# Altium schematic symbol library Datalogger_RevA_Clean.SchLib: 59 symbols
Pins are listed as number, name and electrical type; pins without a type are passive.

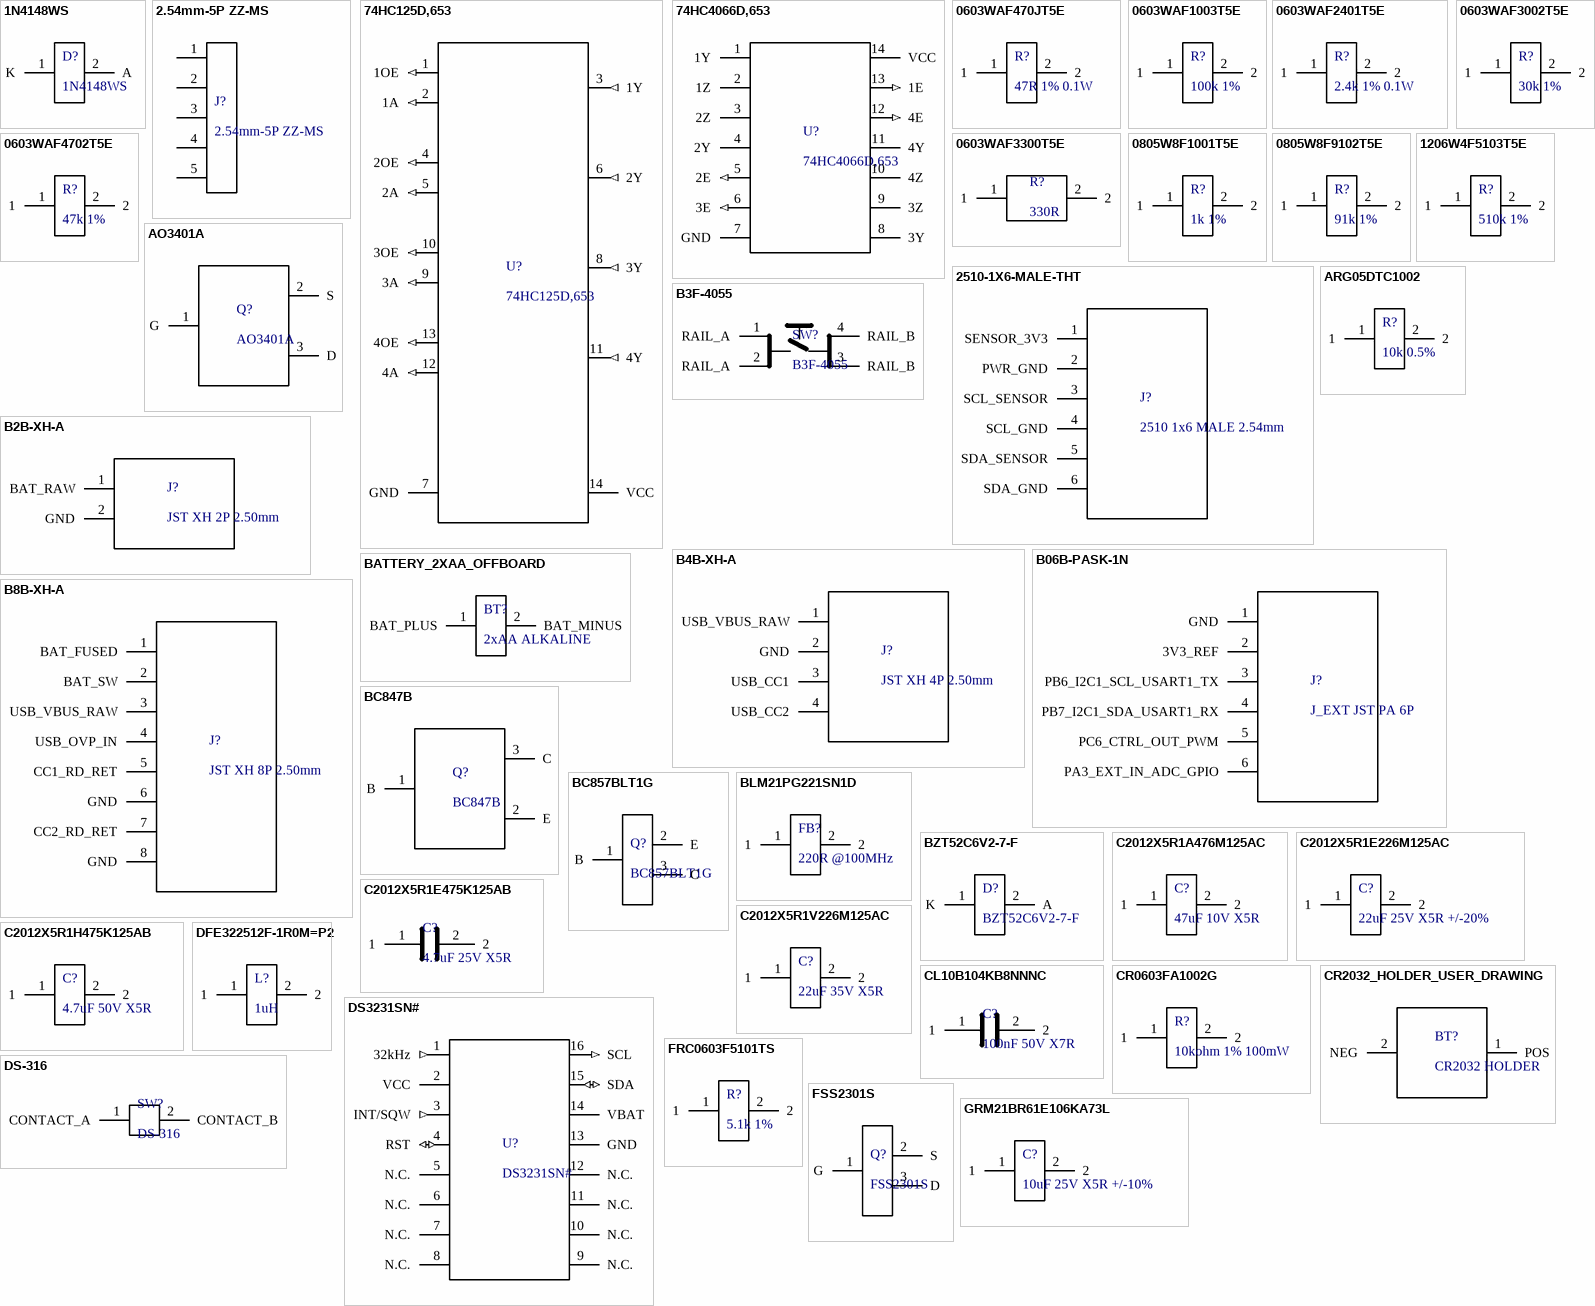
[diagram p0: symbols 1N4148WS to GRM21BR61E106KA73L]

## 1N4148WS
designator D?
Fast switching diode; SOD323; pin 1 cathode K, pin 2 anode A for Task19 delay discharge path; Manufacturer: MULTISOURCE; FOOTPRINT GEOMETRY SOURCE=Diodes Incorporated; Source_Baseline: Datalogger_OLED_SHT3x_Final_BOM_RevA_v1.3_FA.pdf + TASK18_RTC_RELEASE_2026-08-22 + TASK19_CONTROLLED_DELTAS_2026-08-22; Design_Status: TASK19_BOM_DEVICE_GEOMETRY_DIODES_INC_REFERENCE; Qualification_Status: UNQUALIFIED_PENDING_SAVE_REOPEN_AUDIT; PIN_NUMBER_SOURCE: MANUFACTURER_DATASHEET; MPN: 1N4148WS; Value: 1N4148WS; Package: SOD323; Datasheet: https://www.diodes.com/datasheet/download/1N4148WS.pdf; PIN_FUNCTION_SOURCE: MANUFACTURER_DATASHEET
footprint DIODES_SOD323_1N4148WS_2P (Task19 controlled footprint model link)
pins: 1 K, 2 A

## 2.54mm-5P ZZ-MS
designator J?
Five-position vertical THT Navigation connector; SHOUHAN drawing pitch 2.50 mm; Manufacturer: SHENZHEN SHOUHAN TECHNOLOGY CO., LTD; Source_Baseline: TASK17_NAVIGATION_ENTRY_BASELINE_v1.0_FA.txt; Design_Status: DESIGN_LOCK_NAV_V1.0_JNAV; Qualification_Status: UNQUALIFIED_PENDING_SAVE_REOPEN_AUDIT; PIN_NUMBER_SOURCE: PROJECT_INTERNAL_CONVENTION_LEFT_TO_RIGHT; PIN_FUNCTION_SOURCE: NAVIGATION_V1.0_PROJECT_CONNECTOR_MAPPING; MPN: 2.54mm-5P ZZ-MS; Value: 2.54mm-5P ZZ-MS; Package: 1x5 vertical THT; drawing pitch 2.50mm; Datasheet: SHOUHAN exact 2.54mm-5P ZZ-MS specification/drawing
footprint SHOUHAN_2P50_1X05_ZZMS_THT (Datalogger Rev-A Task17 Navigation J_NAV physical model link)
pins: 1, 2, 3, 4, 5

## 74HC125D,653
designator U?
Quad buffer/line driver with 3-state outputs; OE active-low; Manufacturer: Nexperia; Source_Baseline: MICROSD_SCHEMATIC_ENTRY_BASELINE_v1.2_FA.txt; Design_Status: DESIGN_LOCK_MICROSD_V1.2; Qualification_Status: UNQUALIFIED_PENDING_SAVE_REOPEN_AUDIT; PIN_NUMBER_SOURCE: MANUFACTURER_DATASHEET; MPN: 74HC125D,653; Value: 74HC125D,653; Package: SO14 / SOT108-1; Datasheet: https://assets.nexperia.com/documents/data-sheet/74HC_HCT125.pdf; PIN_FUNCTION_SOURCE: MANUFACTURER_DATASHEET
footprint NEXPERIA_SOT108_1_SO14_14P (Datalogger Rev-A T16 MicroSD physical model link)
pins: 1 1OE (in), 2 1A (in), 3 1Y (out), 4 2OE (in), 5 2A (in), 6 2Y (out), 7 GND (power), 8 3Y (out), 9 3A (in), 10 3OE (in), 11 4Y (out), 12 4A (in), 13 4OE (in), 14 VCC (power)

## 74HC4066D,653
designator U?
Nexperia quad SPST analog switch; enable inputs active HIGH; SO14 SOT108-1; Source_Baseline: Datalogger_OLED_SHT3x_Final_BOM_RevA_v1.3_FA.pdf + TASK18_RTC_RELEASE_2026-08-22 + TASK19_CONTROLLED_DELTAS_2026-08-22; Design_Status: TASK19_CONTROLLED_NEXPERIA_REV12; Qualification_Status: UNQUALIFIED_PENDING_SAVE_REOPEN_AUDIT; PIN_NUMBER_SOURCE: MANUFACTURER_DATASHEET; Manufacturer: Nexperia; MPN: 74HC4066D,653; Value: 74HC4066D,653; Package: SO14 / SOT108-1; Datasheet: https://assets.nexperia.com/documents/data-sheet/74HC_HCT4066.pdf; PIN_FUNCTION_SOURCE: MANUFACTURER_DATASHEET
footprint NEXPERIA_SOT108_1_SO14_14P (Task19 controlled footprint model link)
pins: 1 1Y, 2 1Z, 3 2Z, 4 2Y, 5 2E (in), 6 3E (in), 7 GND (power), 8 3Y, 9 3Z, 10 4Z, 11 4Y, 12 4E (in), 13 1E (in), 14 VCC (power)

## 0603WAF470JT5E
designator R?, comment 47R 1% 0.1W
Task19 SHT3x I2C series resistor; Manufacturer: UNI-ROYAL; MPN: 0603WAF470JT5E; Source_Baseline: Datalogger_OLED_SHT3x_Final_BOM_RevA_v1.3_FA.pdf + TASK18_RTC_RELEASE_2026-08-22 + TASK19_CONTROLLED_DELTAS_2026-08-22; Design_Status: TASK19_CONTROLLED_BOM_REUSE_RES_0603_SHARED_2P; Qualification_Status: UNQUALIFIED_PENDING_SAVE_REOPEN_AUDIT; PIN_NUMBER_SOURCE: INTERNAL_CONVENTION; PIN_FUNCTION_SOURCE: SYMMETRIC_PASSIVE_DEVICE; Value: 47R 1% 0.1W; Package: 0603 / 1608 metric; Datasheet: Controlled BOM value/package; existing UNI-ROYAL WAF family in released project library
footprint RES_0603_SHARED_2P (Task19 controlled footprint model link)
pins: 1, 2

## 0603WAF1003T5E
designator R?, comment 100k 1%
OVP resistor; Manufacturer: UNI-ROYAL; MPN: 0603WAF1003T5E; Source_Baseline: POWER_SCHEMATIC_ENTRY_BASELINE_v0.17_FA.txt; Design_Status: CONTROLLED_V0.17_P9; Qualification_Status: UNQUALIFIED_PENDING_SAVE_REOPEN_AUDIT; PIN_NUMBER_SOURCE: INTERNAL_CONVENTION; PIN_FUNCTION_SOURCE: MANUFACTURER_DATASHEET; Value: 100k 1%; Package: 0603; Datasheet: UNI-ROYAL manufacturer resistor data
footprint RES_0603_SHARED_2P (Datalogger Rev-A G010)
pins: 1, 2

## 0603WAF2401T5E
designator R?, comment 2.4k 1% 0.1W
Task19 external SHT3x I2C pull-up resistor; Manufacturer: UNI-ROYAL; MPN: 0603WAF2401T5E; Source_Baseline: Datalogger_OLED_SHT3x_Final_BOM_RevA_v1.3_FA.pdf + TASK18_RTC_RELEASE_2026-08-22 + TASK19_CONTROLLED_DELTAS_2026-08-22; Design_Status: TASK19_CONTROLLED_BOM_REUSE_RES_0603_SHARED_2P; Qualification_Status: UNQUALIFIED_PENDING_SAVE_REOPEN_AUDIT; PIN_NUMBER_SOURCE: INTERNAL_CONVENTION; PIN_FUNCTION_SOURCE: SYMMETRIC_PASSIVE_DEVICE; Value: 2.4k 1% 0.1W; Package: 0603 / 1608 metric; Datasheet: Controlled BOM value/package; existing UNI-ROYAL WAF family in released project library
footprint RES_0603_SHARED_2P (Task19 controlled footprint model link)
pins: 1, 2

## 0603WAF3002T5E
designator R?, comment 30k 1%
Power network resistor; Manufacturer: UNI-ROYAL; MPN: 0603WAF3002T5E; Source_Baseline: POWER_SCHEMATIC_ENTRY_BASELINE_v0.17_FA.txt; Design_Status: DESIGN_LOCK_V0.17; Qualification_Status: UNQUALIFIED_PENDING_SAVE_REOPEN_AUDIT; PIN_NUMBER_SOURCE: INTERNAL_CONVENTION; PIN_FUNCTION_SOURCE: MANUFACTURER_DATASHEET; Value: 30k 1%; Package: 0603; Datasheet: UNI-ROYAL manufacturer resistor data
footprint RES_0603_SHARED_2P (Datalogger Rev-A G010)
pins: 1, 2

## 0603WAF3300T5E
designator R?, comment 330R
External-port series resistor; 330 ohm 1% 100mW 0603; Manufacturer: UNI-ROYAL; MPN: 0603WAF3300T5E; Value: 330R 1%; Source_Baseline: T21_JEXT_PROTECTION_LOCK_2026-08-28; Design_Status: T21_LOCK; Qualification_Status: CONTROLLED; PIN_NUMBER_SOURCE: INTERNAL_CONVENTION; PIN_FUNCTION_SOURCE: PASSIVE_RESISTOR; Package: 0603; Power: 100mW; Datasheet: UNI-ROYAL 0603WAF3300T5E / LCSC C23138
footprint RES_0603_SHARED_2P (T21 330R series resistor shared 0603 footprint)
pins: 1, 2

## 0603WAF4702T5E
designator R?, comment 47k 1%
OVP resistor; Manufacturer: UNI-ROYAL; MPN: 0603WAF4702T5E; Source_Baseline: POWER_SCHEMATIC_ENTRY_BASELINE_v0.17_FA.txt; Design_Status: CONTROLLED_V0.17_P9; Qualification_Status: UNQUALIFIED_PENDING_SAVE_REOPEN_AUDIT; PIN_NUMBER_SOURCE: INTERNAL_CONVENTION; PIN_FUNCTION_SOURCE: MANUFACTURER_DATASHEET; Value: 47k 1%; Package: 0603; Datasheet: UNI-ROYAL manufacturer resistor data
footprint RES_0603_SHARED_2P (Datalogger Rev-A G010)
pins: 1, 2

## 0805W8F1001T5E
designator R?, comment 1k 1%
OVP series resistor; Manufacturer: UNI-ROYAL; MPN: 0805W8F1001T5E; Source_Baseline: POWER_SCHEMATIC_ENTRY_BASELINE_v0.17_FA.txt; Design_Status: CONTROLLED_V0.17_P9; Qualification_Status: UNQUALIFIED_PENDING_SAVE_REOPEN_AUDIT; PIN_NUMBER_SOURCE: INTERNAL_CONVENTION; PIN_FUNCTION_SOURCE: MANUFACTURER_DATASHEET; Value: 1k 1%; Package: 0805; Datasheet: UNI-ROYAL manufacturer resistor data
footprint RES_0805_SHARED_2P (Datalogger Rev-A G011)
pins: 1, 2

## 0805W8F9102T5E
designator R?, comment 91k 1%
Power feedback/hysteresis resistor; Manufacturer: UNI-ROYAL; MPN: 0805W8F9102T5E; Source_Baseline: POWER_SCHEMATIC_ENTRY_BASELINE_v0.17_FA.txt; Design_Status: DESIGN_LOCK_V0.17; Qualification_Status: UNQUALIFIED_PENDING_SAVE_REOPEN_AUDIT; PIN_NUMBER_SOURCE: INTERNAL_CONVENTION; PIN_FUNCTION_SOURCE: MANUFACTURER_DATASHEET; Value: 91k 1%; Package: 0805; Datasheet: UNI-ROYAL manufacturer resistor data
footprint RES_0805_SHARED_2P (Datalogger Rev-A G011)
pins: 1, 2

## 1206W4F5103T5E
designator R?, comment 510k 1%
Power feedback resistor; Manufacturer: UNI-ROYAL; MPN: 1206W4F5103T5E; Source_Baseline: POWER_SCHEMATIC_ENTRY_BASELINE_v0.17_FA.txt; Design_Status: DESIGN_LOCK_V0.17; Qualification_Status: UNQUALIFIED_PENDING_SAVE_REOPEN_AUDIT; PIN_NUMBER_SOURCE: INTERNAL_CONVENTION; PIN_FUNCTION_SOURCE: MANUFACTURER_DATASHEET; Value: 510k 1%; Package: 1206; Datasheet: UNI-ROYAL manufacturer resistor data
footprint UNIROYAL_RES_1206_2P (Datalogger Rev-A G012)
pins: 1, 2

## 2510-1X6-MALE-THT
designator J?, comment 2510 1x6 MALE 2.54mm
PCB-mounted internal SHT3x harness connector; 6-pin straight male 2.54 mm 2510-style THT; external metal/military panel connector remains separate; Manufacturer: GENERIC; MPN: 2510-1X6-MALE-THT; Source_Baseline: T20_USER_APPROVAL_2026-08-26; Design_Status: TASK20_CONTROLLED_PCB_CONNECTOR; Qualification_Status: MECHANICAL_FIT_PENDING_PHYSICAL_SAMPLE; PIN_NUMBER_SOURCE: PROJECT_INTERNAL_PCB_ORDER_LOCK_2026-08-26; PIN_FUNCTION_SOURCE: USER_APPROVED_T20_SIGNAL_ORDER_2026-08-26; Value: 2510 1x6 MALE 2.54mm; Package: THT 1x6, pitch 2.54 mm; Datasheet: USER_SUPPLIED_6CCT_2P54_DRAWING_2026-08-26; supplier code 2171001040
footprint GENERIC_2510_1X6_P2P54_THT (Task20 controlled 2510 1x6 PCB harness connector footprint | same-folder PcbLib verified v0.1.1)
pins: 1 SENSOR_3V3, 2 PWR_GND, 3 SCL_SENSOR, 4 SCL_GND, 5 SDA_SENSOR, 6 SDA_GND

## AO3401A
designator Q?
-30V P-channel MOSFET used as switched SD_VDD high-side pass element; Manufacturer: Alpha & Omega Semiconductor; Source_Baseline: MICROSD_SCHEMATIC_ENTRY_BASELINE_v1.2_FA.txt; Design_Status: DESIGN_LOCK_MICROSD_V1.2_PIN_NUMBER_CONVENTION_PENDING_FOOTPRINT_CROSSCHECK; Qualification_Status: UNQUALIFIED_PENDING_SAVE_REOPEN_AUDIT; PIN_NUMBER_SOURCE: INTERNAL_CONVENTION_PENDING_PHYSICAL_ORIENTATION_CROSSCHECK; PIN_FUNCTION_SOURCE: MANUFACTURER_DATASHEET; MPN: AO3401A; Value: AO3401A; Package: SOT-23; Datasheet: https://www.aosmd.com/sites/default/files/res/datasheets/AO3401A.pdf
footprint AOS_SOT23_AO3401A_3P (Datalogger Rev-A T16 MicroSD physical model link)
pins: 1 G, 2 S, 3 D

## ARG05DTC1002
designator R?, comment 10k 0.5%
Precision power network resistor; Manufacturer: Viking Tech; MPN: ARG05DTC1002; Source_Baseline: POWER_SCHEMATIC_ENTRY_BASELINE_v0.17_FA.txt; Design_Status: DESIGN_LOCK_V0.17; Qualification_Status: UNQUALIFIED_PENDING_SAVE_REOPEN_AUDIT; PIN_NUMBER_SOURCE: INTERNAL_CONVENTION; PIN_FUNCTION_SOURCE: MANUFACTURER_DATASHEET; Value: 10k 0.5%; Package: 0805 / ARG05; Datasheet: Viking Tech AR series product data
footprint RES_0805_SHARED_2P (Datalogger Rev-A G011)
pins: 1, 2

## B2B-XH-A
designator J?, comment JST XH 2P 2.50mm
PCB-mounted keyed battery harness header; mates with XHP-2 housing; T22 J_BAT interface; Manufacturer: JST (J.S.T. Mfg. Co., Ltd.); MPN: B2B-XH-A(LF)(SN); Contact: SXH-001T-P0.6; Current_Rating: 3A AC/DC with AWG22; Voltage_Rating: 250V AC/DC; Wire_Range: AWG28 to AWG22 with SXH-001T-P0.6; Source_Baseline: T22_USER_APPROVAL_2026-08-29; Design_Status: TASK22_CONTROLLED_POWER_CONNECTOR; Qualification_Status: LIBRARY_GATE_PENDING; PHYSICAL_SAMPLE_FIT_PENDING; PIN_NUMBER_SOURCE: JST_XH_OFFICIAL_MOUNTING_SURFACE_VIEW; PIN_FUNCTION_SOURCE: T22_LOCKED_POWER_CONNECTOR_PINOUT_2026-08-29; Housing: XHP-2; Pitch: 2.50 mm; Datasheet: https://www.jst-mfg.com/product/pdf/eng/eXH.pdf
pins: 1 BAT_RAW, 2 GND

## B3F-4055
designator SW?
Momentary tactile reset switch; four physical terminals preserved; Manufacturer: OMRON; Source_Baseline: MCU_SCHEMATIC_ENTRY_BASELINE_v2.1_FA.txt; Design_Status: DESIGN_LOCK_MCU_CORE_V2.1_FOOTPRINT_HOLD; Qualification_Status: UNQUALIFIED_PENDING_SAVE_REOPEN_AUDIT; PIN_NUMBER_SOURCE: INTERNAL_CONVENTION; PIN_FUNCTION_SOURCE: MANUFACTURER_DATASHEET; MPN: B3F-4055; Value: B3F-4055; Package: 12x12 mm THT tactile switch; Datasheet: https://omronfs.omron.com/en_US/ecb/products/pdf/en-b3f.pdf
footprint OMRON_B3F_12X12_THT_4P (Datalogger Rev-A Task13 MCU Core physical model link)
pins: 1 RAIL_A, 2 RAIL_A, 3 RAIL_B, 4 RAIL_B

## B4B-XH-A
designator J?, comment JST XH 4P 2.50mm
PCB-mounted keyed USB-C panel harness header; mates with XHP-4 housing; T22 J_USB_PANEL interface; Manufacturer: JST (J.S.T. Mfg. Co., Ltd.); MPN: B4B-XH-A(LF)(SN); Contact: SXH-001T-P0.6; Current_Rating: 3A AC/DC with AWG22; Voltage_Rating: 250V AC/DC; Wire_Range: AWG28 to AWG22 with SXH-001T-P0.6; Source_Baseline: T22_USER_APPROVAL_2026-08-29; Design_Status: TASK22_CONTROLLED_POWER_CONNECTOR; Qualification_Status: LIBRARY_GATE_PENDING; PHYSICAL_SAMPLE_FIT_PENDING; PIN_NUMBER_SOURCE: JST_XH_OFFICIAL_MOUNTING_SURFACE_VIEW; PIN_FUNCTION_SOURCE: T22_LOCKED_POWER_CONNECTOR_PINOUT_2026-08-29; Housing: XHP-4; Pitch: 2.50 mm; Datasheet: https://www.jst-mfg.com/product/pdf/eng/eXH.pdf
pins: 1 USB_VBUS_RAW, 2 GND, 3 USB_CC1, 4 USB_CC2

## B06B-PASK-1N
designator J?, comment J_EXT JST PA 6P
Protected external signal expansion port; JST PA 6-pin top-entry THT with boss; external modules are self-powered except low-current 3V3_REF; MPN: B06B-PASK-1N; Value: JST PA 6P 2.0mm; Mating_Housing: PAP-06V-S; Port_Policy: SIGNAL_PORT; EXTERNAL_MODULES_SELF_POWERED; PIN2_3V3_REF_NOT_POWER_OUTPUT; Source_Baseline: T21_EXPANSION_DECISIONS_2026-08-28 + JST official PA family; Design_Status: T21_LOCK; Qualification_Status: MECHANICAL_DATASHEET_LOCKED_PHYSICAL_SAMPLE_FIT_PENDING; PIN_NUMBER_SOURCE: JST_CIRCUIT_NUMBERING; PIN_FUNCTION_SOURCE: T21_JEXT_SIGNAL_PORT_LOCK_2026-08-28; Manufacturer: JST; Package: PA family top-entry N type THT with boss, 6 circuits, 2.0 mm pitch; Datasheet: JST PA FAMILY ePA-F.pdf; B06B-PASK-1N
footprint JST_PA_B06B_PASK_1N_6P_THT (T21 J_EXT JST PA B06B-PASK-1N)
pins: 1 GND, 2 3V3_REF, 3 PB6_I2C1_SCL_USART1_TX, 4 PB7_I2C1_SDA_USART1_RX, 5 PC6_CTRL_OUT_PWM, 6 PA3_EXT_IN_ADC_GPIO

## B8B-XH-A
designator J?, comment JST XH 8P 2.50mm
PCB-mounted keyed harness header for four-pole maintained off-board master switch; mates with XHP-8 housing; T22 J_PWR_SW interface; Manufacturer: JST (J.S.T. Mfg. Co., Ltd.); MPN: B8B-XH-A(LF)(SN); Contact: SXH-001T-P0.6; Current_Rating: 3A AC/DC with AWG22; Voltage_Rating: 250V AC/DC; Wire_Range: AWG28 to AWG22 with SXH-001T-P0.6; Source_Baseline: T22_USER_APPROVAL_2026-08-29; Design_Status: TASK22_CONTROLLED_POWER_CONNECTOR; Qualification_Status: LIBRARY_GATE_PENDING; PHYSICAL_SAMPLE_FIT_PENDING; PIN_NUMBER_SOURCE: JST_XH_OFFICIAL_MOUNTING_SURFACE_VIEW; PIN_FUNCTION_SOURCE: T22_LOCKED_POWER_CONNECTOR_PINOUT_2026-08-29; Housing: XHP-8; Pitch: 2.50 mm; Datasheet: https://www.jst-mfg.com/product/pdf/eng/eXH.pdf
pins: 1 BAT_FUSED, 2 BAT_SW, 3 USB_VBUS_RAW, 4 USB_OVP_IN, 5 CC1_RD_RET, 6 GND, 7 CC2_RD_RET, 8 GND

## BATTERY_2XAA_OFFBOARD
designator BT?, comment 2xAA ALKALINE
Off-board two-cell AA battery holder logical interface; Manufacturer: PROJECT_LOGICAL; MPN: BATTERY_2XAA_OFFBOARD; Source_Baseline: POWER_SCHEMATIC_ENTRY_BASELINE_v0.17_FA.txt; Qualification_Status: UNQUALIFIED_PENDING_SAVE_REOPEN_AUDIT; PIN_NUMBER_SOURCE: PROJECT_LOGICAL_DEFINITION; Value: 2xAA ALKALINE; Package: LOGICAL_OFFBOARD; Datasheet: POWER_SCHEMATIC_ENTRY_BASELINE_v0.17_FA.txt; Design_Status: PROJECT_LOGICAL; PIN_FUNCTION_SOURCE: PROJECT_LOGICAL_DEFINITION
pins: 1 BAT_PLUS, 2 BAT_MINUS

## BC847B
designator Q?
45V 100mA NPN general-purpose transistor used as SD gate driver; Manufacturer: Nexperia; Source_Baseline: MICROSD_SCHEMATIC_ENTRY_BASELINE_v1.2_FA.txt; Design_Status: DESIGN_LOCK_MICROSD_V1.2; Qualification_Status: UNQUALIFIED_PENDING_SAVE_REOPEN_AUDIT; PIN_NUMBER_SOURCE: MANUFACTURER_DATASHEET; MPN: BC847B; Value: BC847B; Package: SOT-23 / TO-236AB; Datasheet: https://assets.nexperia.com/documents/data-sheet/BC847X_SER.pdf; PIN_FUNCTION_SOURCE: MANUFACTURER_DATASHEET
footprint NEXPERIA_SOT23_TO236AB_3P (Datalogger Rev-A T16 MicroSD physical model link)
pins: 1 B, 2 E, 3 C

## BC857BLT1G
designator Q?
PNP transistor used as OVP gate driver; Manufacturer: onsemi; Source_Baseline: POWER_SCHEMATIC_ENTRY_BASELINE_v0.17_FA.txt; Design_Status: CONTROLLED_V0.17_P9; Qualification_Status: UNQUALIFIED_PENDING_SAVE_REOPEN_AUDIT; PIN_NUMBER_SOURCE: MANUFACTURER_DATASHEET; MPN: BC857BLT1G; Value: BC857BLT1G; Package: SOT-23 / TO-236; Datasheet: onsemi BC856/BC857/BC858 manufacturer datasheet; PIN_FUNCTION_SOURCE: MANUFACTURER_DATASHEET
footprint ONSEMI_CASE318_SOT23_3P (Datalogger Rev-A G006)
pins: 1 B, 2 E, 3 C

## BLM21PG221SN1D
designator FB?, comment 220R @100MHz
Murata BLM21PG ferrite bead, 0805/2012, Task19 sensor supply filter; Manufacturer: Murata Manufacturing Co., Ltd.; MPN: BLM21PG221SN1D; Source_Baseline: Datalogger_OLED_SHT3x_Final_BOM_RevA_v1.3_FA.pdf + TASK18_RTC_RELEASE_2026-08-22 + TASK19_CONTROLLED_DELTAS_2026-08-22; Design_Status: TASK19_CONTROLLED_BOM_REUSE_RES_0805_SHARED_2P; Qualification_Status: UNQUALIFIED_PENDING_SAVE_REOPEN_AUDIT; PIN_NUMBER_SOURCE: INTERNAL_CONVENTION; PIN_FUNCTION_SOURCE: SYMMETRIC_PASSIVE_DEVICE; Value: 220R @100MHz; Package: 0805 / 2012 metric; Datasheet: Murata official BLM21PG221SN1D product data
footprint RES_0805_SHARED_2P (Task19 controlled footprint model link)
pins: 1, 2

## BZT52C6V2-7-F
designator D?
6.2V zener gate-source clamp; Manufacturer: Diodes Incorporated; Source_Baseline: POWER_SCHEMATIC_ENTRY_BASELINE_v0.17_FA.txt; Design_Status: CONTROLLED_V0.17_P9; Qualification_Status: UNQUALIFIED_PENDING_SAVE_REOPEN_AUDIT; PIN_NUMBER_SOURCE: INTERNAL_CONVENTION; PIN_FUNCTION_SOURCE: MANUFACTURER_DATASHEET; MPN: BZT52C6V2-7-F; Value: BZT52C6V2-7-F; Package: SOD-123; Datasheet: https://www.diodes.com/datasheet/download/BZT52Cxx.pdf
footprint DIODES_SOD123_2P (Datalogger Rev-A G007)
pins: 1 K, 2 A

## C2012X5R1A476M125AC
designator C?, comment 47uF 10V X5R
3V3 output ceramic capacitor; Manufacturer: TDK; MPN: C2012X5R1A476M125AC; Source_Baseline: POWER_SCHEMATIC_ENTRY_BASELINE_v0.17_FA.txt; Design_Status: CONTROLLED_V0.17_P9; Qualification_Status: UNQUALIFIED_PENDING_SAVE_REOPEN_AUDIT; PIN_NUMBER_SOURCE: INTERNAL_CONVENTION; PIN_FUNCTION_SOURCE: MANUFACTURER_DATASHEET; Value: 47uF 10V X5R; Package: 0805 / 2012 metric; Datasheet: TDK exact product data C2012X5R1A476M125AC
footprint TDK_C2012_0805_CAP_2P (Datalogger Rev-A G009)
pins: 1, 2

## C2012X5R1E226M125AC
designator C?, comment 22uF 25V X5R +/-20%
MicroSD local bulk ceramic capacitor; Manufacturer: TDK; MPN: C2012X5R1E226M125AC; Source_Baseline: MICROSD_SCHEMATIC_ENTRY_BASELINE_v1.2_FA.txt; Design_Status: DESIGN_LOCK_MICROSD_V1.2_REUSE_CANDIDATE_PENDING_LINK; Qualification_Status: UNQUALIFIED_PENDING_SAVE_REOPEN_AUDIT; PIN_NUMBER_SOURCE: INTERNAL_CONVENTION_1_2; PIN_FUNCTION_SOURCE: MANUFACTURER_PRODUCT_DATA; Value: 22uF 25V X5R +/-20%; Package: C2012 / EIA 0805; Datasheet: https://product.tdk.com/en/search/capacitor/ceramic/mlcc/info?part_no=C2012X5R1E226M125AC
footprint TDK_C2012_0805_REFLOW_2P (Datalogger Rev-A T16 MicroSD physical model link)
pins: 1, 2

## C2012X5R1E475K125AB
designator C?, comment 4.7uF 25V X5R
MCU-core ceramic capacitor; Manufacturer: TDK; MPN: C2012X5R1E475K125AB; Source_Baseline: MCU_SCHEMATIC_ENTRY_BASELINE_v2.1_FA.txt; Design_Status: DESIGN_LOCK_MCU_CORE_V2.1_REUSE_G009_PENDING_LINK; Qualification_Status: UNQUALIFIED_PENDING_SAVE_REOPEN_AUDIT; PIN_NUMBER_SOURCE: INTERNAL_CONVENTION; PIN_FUNCTION_SOURCE: MANUFACTURER_DATASHEET; Value: 4.7uF 25V X5R; Package: C2012 / EIA 0805; Datasheet: https://product.tdk.com/en/search/capacitor/ceramic/mlcc/info?part_no=C2012X5R1E475K125AB
footprint TDK_C2012_0805_REFLOW_2P (Datalogger Rev-A Task13 MCU Core physical model link)
pins: 1, 2

## C2012X5R1H475K125AB
designator C?, comment 4.7uF 50V X5R
Battery-side local ceramic capacitor; Manufacturer: TDK; MPN: C2012X5R1H475K125AB; Source_Baseline: POWER_SCHEMATIC_ENTRY_BASELINE_v0.17_FA.txt; Design_Status: CONTROLLED_V0.17_P9; Qualification_Status: UNQUALIFIED_PENDING_SAVE_REOPEN_AUDIT; PIN_NUMBER_SOURCE: INTERNAL_CONVENTION; PIN_FUNCTION_SOURCE: MANUFACTURER_DATASHEET; Value: 4.7uF 50V X5R; Package: 0805 / 2012 metric; Datasheet: TDK exact product data C2012X5R1H475K125AB
footprint TDK_C2012_0805_CAP_2P (Datalogger Rev-A G009)
pins: 1, 2

## C2012X5R1V226M125AC
designator C?, comment 22uF 35V X5R
Power-path ceramic capacitor; Manufacturer: TDK; MPN: C2012X5R1V226M125AC; Source_Baseline: POWER_SCHEMATIC_ENTRY_BASELINE_v0.17_FA.txt; Design_Status: CONTROLLED_V0.17_P9; Qualification_Status: UNQUALIFIED_PENDING_SAVE_REOPEN_AUDIT; PIN_NUMBER_SOURCE: INTERNAL_CONVENTION; PIN_FUNCTION_SOURCE: MANUFACTURER_DATASHEET; Value: 22uF 35V X5R; Package: 0805 / 2012 metric; Datasheet: TDK exact product data C2012X5R1V226M125AC
footprint TDK_C2012_0805_CAP_2P (Datalogger Rev-A G009)
pins: 1, 2

## CL10B104KB8NNNC
designator C?, comment 100nF 50V X7R
MCU-core ceramic capacitor; Manufacturer: Samsung Electro-Mechanics; MPN: CL10B104KB8NNNC; Source_Baseline: MCU_SCHEMATIC_ENTRY_BASELINE_v2.1_FA.txt; Design_Status: DESIGN_LOCK_MCU_CORE_V2.1_FOOTPRINT_HOLD; Qualification_Status: UNQUALIFIED_PENDING_SAVE_REOPEN_AUDIT; PIN_NUMBER_SOURCE: INTERNAL_CONVENTION; PIN_FUNCTION_SOURCE: MANUFACTURER_DATASHEET; Value: 100nF 50V X7R; Package: 0603 / 1608 metric; Datasheet: https://product.samsungsem.com/mlcc/CL10B104KB8NNN.do
footprint SAMSUNG_CL10_0603_CAP_2P (Datalogger Rev-A Task13 MCU Core physical model link)
pins: 1, 2

## CR0603FA1002G
designator R?, comment 10kohm 1% 100mW
MicroSD SD gate-driver base resistor; Manufacturer: LIZ [supplier-listed]; MPN: CR0603FA1002G; Source_Baseline: MICROSD_SCHEMATIC_ENTRY_BASELINE_v1.2_FA.txt; Design_Status: DESIGN_LOCK_MICROSD_V1.2_FOOTPRINT_SOURCE_HOLD; Qualification_Status: UNQUALIFIED_PENDING_SAVE_REOPEN_AUDIT; PIN_NUMBER_SOURCE: INTERNAL_CONVENTION_1_2; PIN_FUNCTION_SOURCE: CONTROLLED_BOM_PLUS_EXACT_PART_LISTING; Value: 10kohm 1% 100mW; Package: 0603; Datasheet: MicroSD v1.3 plus exact-part supplier listing
footprint RES_0603_SHARED_2P (Datalogger Rev-A T16 MicroSD physical model link)
pins: 1, 2

## CR2032_HOLDER_USER_DRAWING
designator BT?, comment CR2032 HOLDER
Datalogger Rev-A CR2032 vertical THT holder, user-confirmed drawing, 20.00 mm pitch; Manufacturer: UNKNOWN - USER DRAWING; Source_Baseline: Datalogger_RTC_CR2032_Final_BOM_RevA_v1.2_FA.pdf; Physical_Drawing: USER_CONFIRMED_CR2032_HOLDER_DRAWING_2026-08-22; PIN_NUMBER_SOURCE: INTERNAL_CONVENTION; PIN_FUNCTION_SOURCE: USER_CONFIRMED_PHYSICAL_DRAWING; Pin1_Function: POS_VBAT; Pin1_Physical: RIGHT_HOLE_X_PLUS_10P00_MM_TOP_VIEW; Pin2_Function: NEG_GND; Pin2_Physical: LEFT_HOLE_X_MINUS_10P00_MM_TOP_VIEW; Qualification_Status: STRUCTURE_PASS_SAMPLE_FIT_PENDING; MPN: UNKNOWN - USER DRAWING; Package: Vertical THT, 2-pin, 20.00 mm pitch; Footprint_Target: CR2032_HOLDER_VERTICAL_P20_D0P90_2P_THT_REV_B
footprint CR2032_HOLDER_VERTICAL_P20_D0P90_2P_THT_REV_B (T23 controlled CR2032 Rev-B footprint link; pitch 20.00 mm; drill 0.90 mm; pad1 VBAT/POS; pad2 GND/NEG; sample fit pending)
pins: 1 POS (power), 2 NEG (power)

## DFE322512F-1R0M=P2
designator L?, comment 1uH
Shielded power inductor; Manufacturer: Murata; MPN: DFE322512F-1R0M=P2; Source_Baseline: POWER_SCHEMATIC_ENTRY_BASELINE_v0.17_FA.txt; Design_Status: DESIGN_LOCK_V0.17_P9_PENDING; Qualification_Status: UNQUALIFIED_PENDING_SAVE_REOPEN_AUDIT; PIN_NUMBER_SOURCE: INTERNAL_CONVENTION; PIN_FUNCTION_SOURCE: MANUFACTURER_DATASHEET; Value: 1uH; Package: DFE3225; Datasheet: Murata DFE322512F product data
footprint MURATA_DFE322512F_2P (Datalogger Rev-A G002)
pins: 1, 2

## DS3231SN#
designator U?
Analog Devices/Maxim DS3231 industrial I2C RTC/TCXO, 16-SO W16#H2; Manufacturer: Analog Devices / Maxim Integrated; Package_Outline: 21-0042; Land_Pattern: 90-0107; Source_Baseline: Datalogger_RTC_CR2032_Final_BOM_RevA_v1.2_FA.pdf; PIN_NUMBER_SOURCE: MANUFACTURER_DATASHEET; Qualification_Status: UNQUALIFIED_PENDING_SAVE_REOPEN_AUDIT; MPN: DS3231SN#; Package: 16 SO, 300 mil, W16#H2; Datasheet: Analog Devices DS3231 Rev.10; PIN_FUNCTION_SOURCE: MANUFACTURER_DATASHEET
footprint MAXIM_W16H2_SO16_90_0107 (Datalogger Rev-A Task18 RTC DS3231 physical model link | W16#H2 | Maxim 90-0107)
pins: 1 32kHz (out), 2 VCC (power), 3 INT/SQW (out), 4 RST (io), 5 N.C., 6 N.C., 7 N.C., 8 N.C., 9 N.C., 10 N.C., 11 N.C., 12 N.C., 13 GND (power), 14 VBAT (power), 15 SDA (io), 16 SCL (in)

## DS-316
designator SW?
Panel SPST-NO momentary push button; off-board Navigation switch; Manufacturer: DAIER / controlled DS-316 family; Source_Baseline: TASK17_NAVIGATION_ENTRY_BASELINE_v1.0_FA.txt; Design_Status: DESIGN_LOCK_NAV_V1.0_OFFBOARD; Qualification_Status: UNQUALIFIED_PENDING_SAVE_REOPEN_AUDIT; PIN_NUMBER_SOURCE: PROJECT_INTERNAL_CONVENTION; PIN_FUNCTION_SOURCE: NAVIGATION_V1.0_SPST_NO; MPN: DS-316; Value: DS-316; Package: Panel mount; no PCB footprint; Datasheet: Controlled Navigation v1.0 / DS-316 family source
pins: 1 CONTACT_A, 2 CONTACT_B

## FRC0603F5101TS
designator R?, comment 5.1k 1%
USB-C Rd resistor; Manufacturer: FOJAN / FOSAN Technology; MPN: FRC0603F5101TS; Source_Baseline: POWER_SCHEMATIC_ENTRY_BASELINE_v0.17_FA.txt; Design_Status: DESIGN_LOCK_V0.17; Qualification_Status: UNQUALIFIED_PENDING_SAVE_REOPEN_AUDIT; PIN_NUMBER_SOURCE: INTERNAL_CONVENTION; PIN_FUNCTION_SOURCE: MANUFACTURER_DATASHEET; Value: 5.1k 1%; Package: 0603; Datasheet: FRC0603F5101TS-UniOhm.pdf / FOSAN FRC Series FJ-JS-3001-V3.0
footprint RES_0603_SHARED_2P (Datalogger Rev-A G010)
pins: 1, 2

## FSS2301S
designator Q?
-20V P-channel enhancement MOSFET used as USB OVP switch; Manufacturer: FOSAN; Source_Baseline: POWER_SCHEMATIC_ENTRY_BASELINE_v0.17_FA.txt; Design_Status: CONTROLLED_V0.17_P9; Qualification_Status: UNQUALIFIED_PENDING_SAVE_REOPEN_AUDIT; PIN_NUMBER_SOURCE: INTERNAL_CONVENTION; PIN_FUNCTION_SOURCE: MANUFACTURER_DATASHEET; MPN: FSS2301S; Value: FSS2301S; Package: SOT-23; Datasheet: FSS2301S_FOSAN_Official.pdf
footprint FOSAN_SOT23_FSS2301S_3P (Datalogger Rev-A G008)
pins: 1 G, 2 S, 3 D

## GRM21BR61E106KA73L
designator C?, comment 10uF 25V X5R +/-10%
MicroSD local mid-value ceramic capacitor; Manufacturer: Murata Manufacturing; MPN: GRM21BR61E106KA73L; Source_Baseline: MICROSD_SCHEMATIC_ENTRY_BASELINE_v1.2_FA.txt; Design_Status: DESIGN_LOCK_MICROSD_V1.2_FOOTPRINT_COMPARE_PENDING; Qualification_Status: UNQUALIFIED_PENDING_SAVE_REOPEN_AUDIT; PIN_NUMBER_SOURCE: INTERNAL_CONVENTION_1_2; PIN_FUNCTION_SOURCE: MANUFACTURER_PRODUCT_DATA; Value: 10uF 25V X5R +/-10%; Package: 2012M / EIA 0805; Datasheet: https://pim.murata.com/en-global/pim/details/?partNum=GRM21BR61E106KA73%23
footprint MURATA_GRM21_0805_CAP_2P (Datalogger Rev-A T16 MicroSD physical model link)
pins: 1, 2

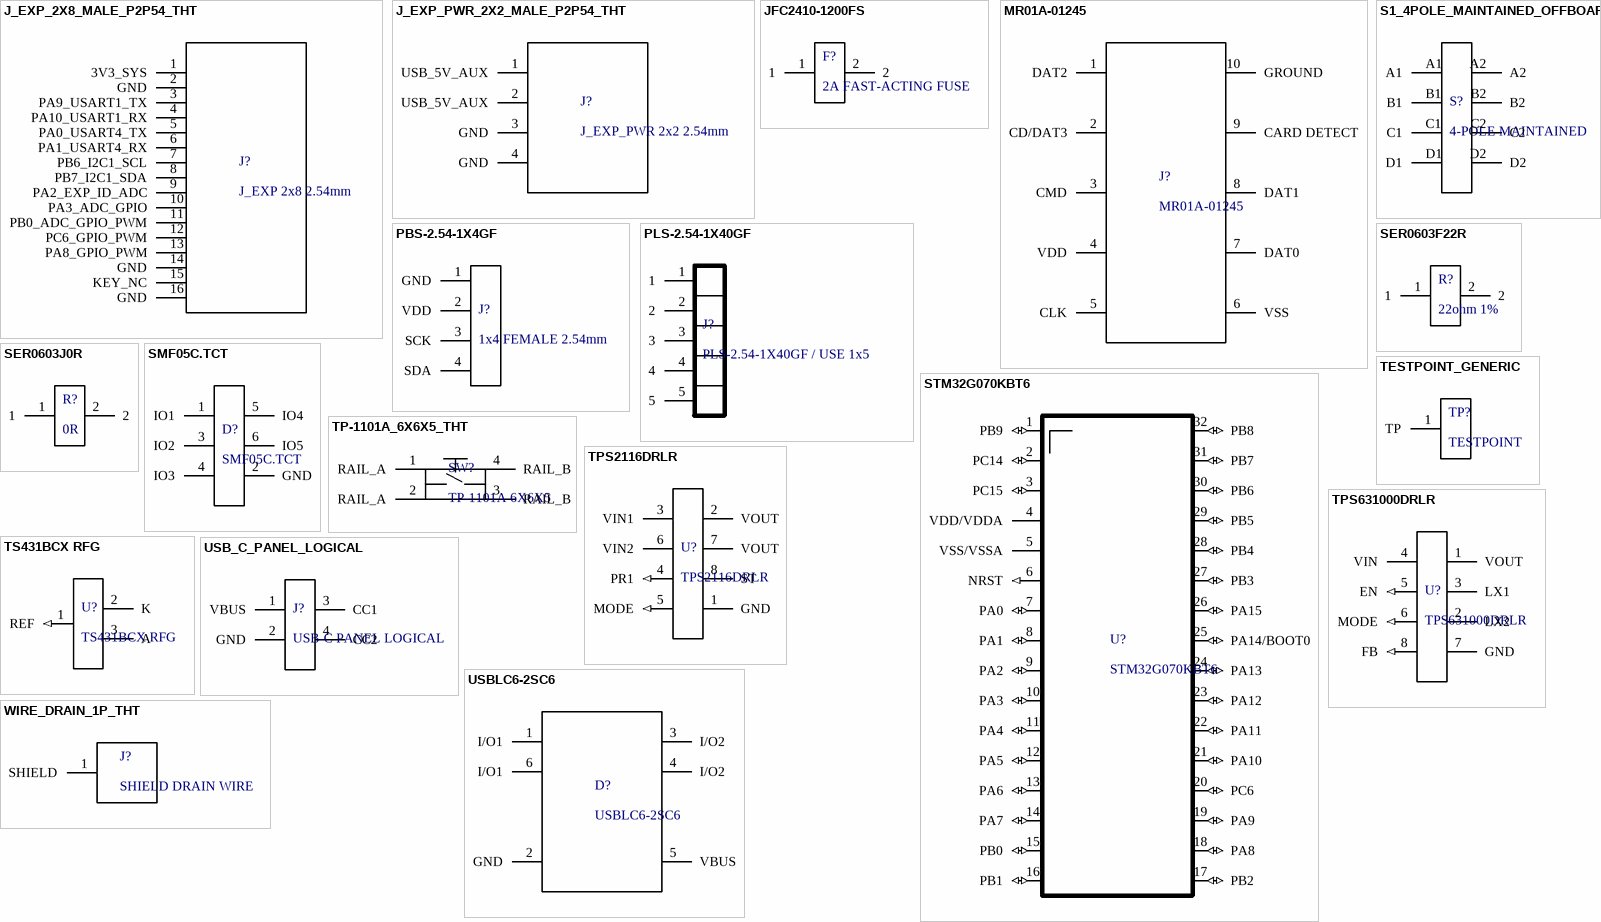
[diagram p1: symbols J_EXP_2X8_MALE_P2P54_THT to WIRE_DRAIN_1P_THT]

## J_EXP_2X8_MALE_P2P54_THT
designator J?, comment J_EXP 2x8 2.54mm
Internal rigid daughterboard expansion header; generic 2x8 male vertical THT; position 15 is KEY/NC and metal pin 15 shall be physically removed; MPN: 2X8-MALE-P2P54-THT; Procurement: Iran generic 2.54mm double-row male header; Lion PLD-2.54-2X40GF may be cut to 2x8; equivalent allowed; Mechanical_Key: POSITION_15_NO_METAL_PIN; mating female cavity 15 shall be blocked; Source_Baseline: T21_EXPANSION_DECISIONS_2026-08-28 + Expansion Architecture RevA v1.0; Design_Status: T21_LOCK; Qualification_Status: GENERIC_GEOMETRY_LOCKED_PHYSICAL_SAMPLE_FIT_PENDING; PIN_NUMBER_SOURCE: PROJECT_PHYSICAL_NUMBERING_LOCK_T21; PIN_FUNCTION_SOURCE: EXPANSION_ARCHITECTURE_REVA_V1.0_PLUS_T21_DECISIONS; Manufacturer: GENERIC; Value: J_EXP 2x8 2.54mm; Package: THT 2x8 pitch 2.54 mm
footprint GENERIC_HEADER_2X8_P2P54_THT (T21 J_EXP generic 2x8 THT)
pins: 1 3V3_SYS, 2 GND, 3 PA9_USART1_TX, 4 PA10_USART1_RX, 5 PA0_USART4_TX, 6 PA1_USART4_RX, 7 PB6_I2C1_SCL, 8 PB7_I2C1_SDA, 9 PA2_EXP_ID_ADC, 10 PA3_ADC_GPIO, 11 PB0_ADC_GPIO_PWM, 12 PC6_GPIO_PWM, 13 PA8_GPIO_PWM, 14 GND, 15 KEY_NC, 16 GND

## J_EXP_PWR_2X2_MALE_P2P54_THT
designator J?, comment J_EXP_PWR 2x2 2.54mm
Internal daughterboard auxiliary power header; USB_5V_AUX output-only; valid only with rigid J_EXP mating so J_EXP key enforces orientation; Manufacturer: GENERIC; MPN: 2X2-MALE-P2P54-THT; Procurement: Iran generic 2.54mm double-row male header; cut from longer strip allowed; Usage_Policy: RIGID_DAUGHTERBOARD_ONLY; NOT_FOR_STANDALONE_CABLE; OUTPUT_ONLY; NO_BACKFEED; Source_Baseline: T21_EXPANSION_DECISIONS_2026-08-28 + Expansion Architecture RevA v1.0; Design_Status: T21_LOCK; Qualification_Status: GENERIC_GEOMETRY_LOCKED; PIN_NUMBER_SOURCE: PROJECT_PHYSICAL_NUMBERING_LOCK_T21; PIN_FUNCTION_SOURCE: EXPANSION_ARCHITECTURE_REVA_V1.0; Value: J_EXP_PWR 2x2 2.54mm; Package: THT 2x2 pitch 2.54 mm
footprint GENERIC_HEADER_2X2_P2P54_THT (T21 J_EXP_PWR generic 2x2 THT)
pins: 1 USB_5V_AUX, 2 USB_5V_AUX, 3 GND, 4 GND

## JFC2410-1200FS
designator F?, comment 2A FAST-ACTING FUSE
Battery input fast-acting fuse; Manufacturer: JDT Fuse; MPN: JFC2410-1200FS; Source_Baseline: POWER_SCHEMATIC_ENTRY_BASELINE_v0.17_FA.txt; Design_Status: PROCUREMENT_LOCK_P9_PENDING; Qualification_Status: UNQUALIFIED_PENDING_SAVE_REOPEN_AUDIT; PIN_NUMBER_SOURCE: INTERNAL_CONVENTION; PIN_FUNCTION_SOURCE: MANUFACTURER_DATASHEET; Value: 2A FAST-ACTING FUSE; Package: 2410 SMD; Datasheet: https://www.jdtfuse.com/upload/PDF/JFC2410FS.pdf
footprint JDT_JFC2410FS_2P (Datalogger Rev-A G003)
pins: 1, 2

## MR01A-01245
designator J?
microSD socket with card detect; pin table controlled by ATOM-A10248 Rev A0; Manufacturer: Shenzhen ATOM Technology; Source_Baseline: MICROSD_SCHEMATIC_ENTRY_BASELINE_v1.2_FA.txt; Design_Status: DESIGN_LOCK_MICROSD_V1.2_SOCKET_DRAWING; Qualification_Status: UNQUALIFIED_PENDING_SAVE_REOPEN_AUDIT; PIN_NUMBER_SOURCE: MANUFACTURER_DRAWING; MPN: MR01A-01245; Value: MR01A-01245; Package: Right-angle SMD/SMT microSD socket; Datasheet: ATOM-A10248 Rev A0 controlled local manufacturer drawing; PIN_FUNCTION_SOURCE: MANUFACTURER_DRAWING
footprint ATOM_MR01A_01245_10P (Datalogger Rev-A T16 MicroSD physical model link)
pins: 1 DAT2, 2 CD/DAT3, 3 CMD, 4 VDD, 5 CLK, 6 VSS, 7 DAT0, 8 DAT1, 9 CARD DETECT, 10 GROUND

## PBS-2.54-1X4GF
designator J?, comment 1x4 FEMALE 2.54mm
Generic 1x4 straight female THT socket for OLED module; purchase identity PBS-2.54-1X4GF; module side is male; Source_Baseline: Datalogger_OLED_SHT3x_Final_BOM_RevA_v1.3_FA.pdf + TASK18_RTC_RELEASE_2026-08-22 + TASK19_CONTROLLED_DELTAS_2026-08-22; Design_Status: TASK19_GENERIC_HEADER_USER_APPROVED_2026-08-22; Qualification_Status: UNQUALIFIED_PENDING_SAVE_REOPEN_AUDIT; PIN_NUMBER_SOURCE: PROJECT_INTERNAL_LEFT_TO_RIGHT_1_TO_4; PIN_FUNCTION_SOURCE: OLED_MODULE_PRINT_AND_CONTROLLED_BOM; Manufacturer: GENERIC; MPN: PBS-2.54-1X4GF; Value: 1x4 FEMALE 2.54mm; Package: THT 1x4, pitch 2.54 mm; Datasheet: Generic geometry reference: Wurth Elektronik 61300411821; project user approval 2026-08-22
footprint GENERIC_SOCKET_1X4_P2P54_THT (Task19 controlled footprint model link)
pins: 1 GND, 2 VDD, 3 SCK, 4 SDA

## PLS-2.54-1X40GF
designator J?, comment PLS-2.54-1X40GF / USE 1x5
1x40 2.54 mm stock strip; five positions used for SWD service header; Manufacturer: NINGBO GOSUN TECHNOLOGY CO.,LTD; Source_Baseline: MCU_SCHEMATIC_ENTRY_BASELINE_v2.1_FA.txt; Design_Status: DESIGN_LOCK_MCU_CORE_V2.1_MECHANICAL_HOLD; Qualification_Status: UNQUALIFIED_PENDING_SAVE_REOPEN_AUDIT; PIN_NUMBER_SOURCE: INTERNAL_CONVENTION; PIN_FUNCTION_SOURCE: MCU_CORE_V2.1_PROJECT_MAPPING; MPN: PLS-2.54-1X40GF; Value: PLS-2.54-1X40GF / USE 1x5; Package: 2.54 mm single-row pin header stock strip; Datasheet: Manufacturer PLS series ordering code; mechanical drawing still controlled HOLD
footprint GOSUN_PLS_2P54_1X5_THT (Datalogger Rev-A Task13 MCU Core physical model link)
pins: 1, 2, 3, 4, 5

## S1_4POLE_MAINTAINED_OFFBOARD
designator S?, comment 4-POLE MAINTAINED
Four independent maintained off-board switch contacts; Manufacturer: PROJECT_LOGICAL; MPN: S1_4POLE_MAINTAINED_OFFBOARD; Source_Baseline: POWER_SCHEMATIC_ENTRY_BASELINE_v0.17_FA.txt; Design_Status: PROJECT_LOGICAL_MECH_HOLD; Qualification_Status: UNQUALIFIED_PENDING_SAVE_REOPEN_AUDIT; PIN_NUMBER_SOURCE: PROJECT_LOGICAL_DEFINITION; Value: 4-POLE MAINTAINED; Package: LOGICAL_OFFBOARD; Datasheet: POWER_SCHEMATIC_ENTRY_BASELINE_v0.17_FA.txt; PIN_FUNCTION_SOURCE: PROJECT_LOGICAL_DEFINITION
footprint JST_XH_B8B_XH_A_8P_THT (JST XH B8B-XH-A top-entry THT)
pins: A1, A2, B1, B2, C1, C2, D1, D2

## SER0603F22R
designator R?, comment 22ohm 1%
MicroSD MISO series resistor; Manufacturer: VO Sub Brand (ER) [supplier-listed]; MPN: SER0603F22R; Source_Baseline: MICROSD_SCHEMATIC_ENTRY_BASELINE_v1.2_FA.txt; Design_Status: DESIGN_LOCK_MICROSD_V1.2_FOOTPRINT_SOURCE_HOLD; Qualification_Status: UNQUALIFIED_PENDING_SAVE_REOPEN_AUDIT; PIN_NUMBER_SOURCE: INTERNAL_CONVENTION_1_2; PIN_FUNCTION_SOURCE: CONTROLLED_BOM_PLUS_SUPPLIER_LISTING; Value: 22ohm 1%; Package: 0603; Datasheet: https://lionelectronic.ir/products/1154-SER0603F22R
footprint RES_0603_SHARED_2P (Datalogger Rev-A T16 MicroSD physical model link)
pins: 1, 2

## SER0603J0R
designator R?, comment 0R
Zero-ohm mode strap; Manufacturer: VICO / Anhui Xiangsheng Technology; MPN: SER0603J0R; Source_Baseline: POWER_SCHEMATIC_ENTRY_BASELINE_v0.17_FA.txt; Design_Status: DESIGN_LOCK_V0.17; Qualification_Status: UNQUALIFIED_PENDING_SAVE_REOPEN_AUDIT; PIN_NUMBER_SOURCE: INTERNAL_CONVENTION; PIN_FUNCTION_SOURCE: MANUFACTURER_DATASHEET; Value: 0R; Package: 0603; Datasheet: SER0603J0R-VO-Sub-Brand-(ER).pdf
footprint RES_0603_SHARED_2P (Datalogger Rev-A G010)
pins: 1, 2

## SMF05C.TCT
designator D?
Five-line ESD protection array; Manufacturer: Semtech; Source_Baseline: POWER_SCHEMATIC_ENTRY_BASELINE_v0.17_FA.txt; Design_Status: CONTROLLED_V0.17; Qualification_Status: UNQUALIFIED_PENDING_SAVE_REOPEN_AUDIT; PIN_NUMBER_SOURCE: MANUFACTURER_DATASHEET; MPN: SMF05C.TCT; Value: SMF05C.TCT; Package: SC70-6; Datasheet: https://www.semtech.com/products/circuit-protection/esd-protection/smf05c; PIN_FUNCTION_SOURCE: MANUFACTURER_DATASHEET
footprint SEMTECH_SC70_6L_SMF05C (Datalogger Rev-A G004)
pins: 1 IO1, 2 GND, 3 IO2, 4 IO3, 5 IO4, 6 IO5

## STM32G070KBT6
designator U?
Main MCU for Datalogger Rev-A; controlled 32-pin package map; Manufacturer: STMicroelectronics; Source_Baseline: MCU_SCHEMATIC_ENTRY_BASELINE_v2.1_FA.txt; Design_Status: DESIGN_LOCK_MCU_CORE_V2.1; Qualification_Status: UNQUALIFIED_PENDING_SAVE_REOPEN_AUDIT; PIN_NUMBER_SOURCE: MANUFACTURER_DATASHEET; MPN: STM32G070KBT6; Value: STM32G070KBT6; Package: LQFP32 7x7 mm P0.8; Datasheet: https://www.st.com/resource/en/datasheet/stm32g070kb.pdf; PIN_FUNCTION_SOURCE: MANUFACTURER_DATASHEET
footprint ST_LQFP32_7X7_P0P8_32P (Datalogger Rev-A Task13 MCU Core physical model link)
pins: 1 PB9 (io), 2 PC14 (io), 3 PC15 (io), 4 VDD/VDDA (power), 5 VSS/VSSA (power), 6 NRST (in), 7 PA0 (io), 8 PA1 (io), 9 PA2 (io), 10 PA3 (io), 11 PA4 (io), 12 PA5 (io), 13 PA6 (io), 14 PA7 (io), 15 PB0 (io), 16 PB1 (io), 17 PB2 (io), 18 PA8 (io), 19 PA9 (io), 20 PC6 (io), 21 PA10 (io), 22 PA11 (io), 23 PA12 (io), 24 PA13 (io), 25 PA14/BOOT0 (io), 26 PA15 (io), 27 PB3 (io), 28 PB4 (io), 29 PB5 (io), 30 PB6 (io), 31 PB7 (io), 32 PB8 (io)

## TESTPOINT_GENERIC
designator TP?, comment TESTPOINT
Generic schematic test point; Manufacturer: PROJECT_LOGICAL; MPN: TESTPOINT_GENERIC; Source_Baseline: POWER_SCHEMATIC_ENTRY_BASELINE_v0.17_FA.txt; Qualification_Status: UNQUALIFIED_PENDING_SAVE_REOPEN_AUDIT; PIN_NUMBER_SOURCE: PROJECT_LOGICAL_DEFINITION; Value: TESTPOINT; Package: LOGICAL; Datasheet: POWER_SCHEMATIC_ENTRY_BASELINE_v0.17_FA.txt; Design_Status: PROJECT_LOGICAL; PIN_FUNCTION_SOURCE: PROJECT_LOGICAL_DEFINITION
footprint TESTPOINT_GENERIC_1P5MM (Datalogger Rev-A G013)
pins: 1 TP

## TP-1101A_6X6X5_THT
designator SW?, comment TP-1101A 6X6X5
Generic TP-1101A-compatible momentary SPST-NO tactile switch; 6x6x5 mm; four-pin THT; sample fit pending; Manufacturer: MULTISOURCE; MPN: TP-1101A_COMPATIBLE_6X6X5; Value: TACT SWITCH 6X6X5; Source_Baseline: Datalogger Rev-A post-BT2 controlled library, user-confirmed 2026-09-03; Design_Status: T23_CONTROLLED_ADDITIVE_DELTA; Qualification_Status: SAMPLE_FIT_PENDING; PIN_NUMBER_SOURCE: OMRON_B3F_REFERENCE_TOP_VIEW; PIN_FUNCTION_SOURCE: RAIL_A_1_2_RAIL_B_3_4; Package: 6x6x5 mm THT 4-pin; PCB pitch 6.5x4.5 mm; Datasheet: Omron B3F 6x6 THT geometry reference; procurement sample controls final fit
footprint TACT_6X6_H5_P6P5_X4P5_4P_THT_REV_A (T23 controlled TP-1101A-compatible 6x6x5 reset-switch footprint)
pins: 1 RAIL_A, 2 RAIL_A, 3 RAIL_B, 4 RAIL_B

## TPS2116DRLR
designator U?
Power multiplexer with priority control; Manufacturer: Texas Instruments; Source_Baseline: POWER_SCHEMATIC_ENTRY_BASELINE_v0.17_FA.txt; Design_Status: CONTROLLED_V0.17_P9; Qualification_Status: UNQUALIFIED_PENDING_SAVE_REOPEN_AUDIT; PIN_NUMBER_SOURCE: MANUFACTURER_DATASHEET; MPN: TPS2116DRLR; Value: TPS2116DRLR; Package: DRL / SOT-5X3-8; Datasheet: https://www.ti.com/lit/ds/symlink/tps2116.pdf; PIN_FUNCTION_SOURCE: MANUFACTURER_DATASHEET
footprint TI_DRL0008A_8P (Datalogger Rev-A G001)
pins: 1 GND (power), 2 VOUT (power), 3 VIN1 (power), 4 PR1 (in), 5 MODE (in), 6 VIN2 (power), 7 VOUT (power), 8 ST (oc)

## TPS631000DRLR
designator U?
3.3V system buck-boost converter; Manufacturer: Texas Instruments; Source_Baseline: POWER_SCHEMATIC_ENTRY_BASELINE_v0.17_FA.txt; Design_Status: DESIGN_LOCK_V0.17_P9_PENDING; Qualification_Status: UNQUALIFIED_PENDING_SAVE_REOPEN_AUDIT; PIN_NUMBER_SOURCE: MANUFACTURER_DATASHEET; MPN: TPS631000DRLR; Value: TPS631000DRLR; Package: DRL / SOT-5X3-8; Datasheet: https://www.ti.com/lit/ds/symlink/tps631000.pdf; PIN_FUNCTION_SOURCE: MANUFACTURER_DATASHEET
footprint TI_DRL0008A_8P (Datalogger Rev-A G001)
pins: 1 VOUT (power), 2 LX2 (power), 3 LX1 (power), 4 VIN (power), 5 EN (in), 6 MODE (in), 7 GND (power), 8 FB (in)

## TS431BCX RFG
designator U?
Programmable shunt reference, B grade; Manufacturer: Taiwan Semiconductor; Source_Baseline: POWER_SCHEMATIC_ENTRY_BASELINE_v0.17_FA.txt; Design_Status: CONTROLLED_V0.17_P9; Qualification_Status: UNQUALIFIED_PENDING_SAVE_REOPEN_AUDIT; PIN_NUMBER_SOURCE: MANUFACTURER_DATASHEET; MPN: TS431BCX RFG; Value: TS431BCX RFG; Package: SOT-23; Datasheet: https://services.taiwansemi.com/storage/resources/datasheet/TS431_K2412.pdf; PIN_FUNCTION_SOURCE: MANUFACTURER_DATASHEET
footprint TSC_SOT23_TS431_3P (Datalogger Rev-A G005)
pins: 1 REF (in), 2 K, 3 A

## USB_C_PANEL_LOGICAL
designator J?, comment USB-C PANEL LOGICAL
Off-board USB-C panel connector logical interface; Manufacturer: PROJECT_LOGICAL; MPN: USB_C_PANEL_LOGICAL; Source_Baseline: POWER_SCHEMATIC_ENTRY_BASELINE_v0.17_FA.txt; Qualification_Status: UNQUALIFIED_PENDING_SAVE_REOPEN_AUDIT; PIN_NUMBER_SOURCE: PROJECT_LOGICAL_DEFINITION; Value: USB-C PANEL LOGICAL; Package: LOGICAL_OFFBOARD; Datasheet: POWER_SCHEMATIC_ENTRY_BASELINE_v0.17_FA.txt; Design_Status: PROJECT_LOGICAL; PIN_FUNCTION_SOURCE: PROJECT_LOGICAL_DEFINITION
pins: 1 VBUS, 2 GND, 3 CC1, 4 CC2

## USBLC6-2SC6
designator D?
Two-line low-capacitance ESD protector; ST device purchased for Rev-A; Manufacturer: STMicroelectronics; Source_Baseline: MICROSD_SCHEMATIC_ENTRY_BASELINE_v1.2_FA.txt; Design_Status: DESIGN_LOCK_MICROSD_V1.2_ST_PROCUREMENT; Qualification_Status: UNQUALIFIED_PENDING_SAVE_REOPEN_AUDIT; PIN_NUMBER_SOURCE: MANUFACTURER_DATASHEET; MPN: USBLC6-2SC6; Value: USBLC6-2SC6; Package: SOT23-6L; Datasheet: https://www.st.com/resource/en/datasheet/usblc6-2.pdf; PIN_FUNCTION_SOURCE: MANUFACTURER_DATASHEET
footprint ST_SOT23_6L_USBLC6_6P (Datalogger Rev-A T16 MicroSD physical model link)
pins: 1 I/O1, 2 GND, 3 I/O2, 4 I/O2, 5 VBUS, 6 I/O1

## WIRE_DRAIN_1P_THT
designator J?, comment SHIELD DRAIN WIRE
Dedicated PCB termination for external cable shield/drain wire; 1-pin THT solder pad; Task20 controlled; Manufacturer: GENERIC; MPN: WIRE_DRAIN_1P_THT; Design_Status: TASK20_CONTROLLED; Qualification_Status: PHYSICAL_FIT_PENDING; Cable_Target: 3-pair x 24AWG shielded, drain wire; Value: SHIELD DRAIN WIRE; Package: 1-pin THT solder pad
footprint WIRE_DRAIN_1P_D1P20_P2P40_THT (Task20 J_SHIELD dedicated drain-wire solder pad)
pins: 1 SHIELD